# Altium integrated library MAX31856MUD_T.IntLib: 1 symbol
Pins are listed as number, name and electrical type; pins without a type are passive.

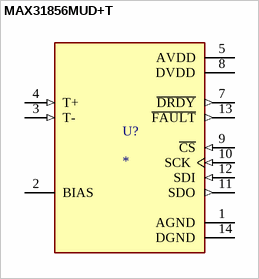
[diagram p0: symbol MAX31856MUD+T]

## MAX31856MUD+T
designator U?
Precision Thermocouple to Digital Converter with Linearization; MF: Analog Devices; MP: MAX31856MUD+T; SnapEDA_Link: https://www.snapeda.com/parts/MAX31856MUD+T/Analog+Devices/view-part/?ref=snap; Package: TSSOP-14 Maxim; Value: *; Check_prices: https://www.snapeda.com/parts/MAX31856MUD+T/Analog+Devices/view-part/?ref=eda
footprint SOP65P640X110-14N
pins: 1 AGND (power), 2 BIAS, 3 T- (in), 4 T+ (in), 5 AVDD (power), 7 ~{DRDY} (out), 8 DVDD (power), 9 ~{CS} (in), 10 SCK (in), 11 SDO (out), 12 SDI (in), 13 ~{FAULT} (out), 14 DGND (power)